# Altium footprint library MainController.PcbLib: 68 footprints (part 3 of 5)
Each footprint in its own frame and in the unit in brackets; x right, y up, seen from the top. Pads: shape width x height; smd on the part's side, far side on the other; paste and mask are expansions set on the pad; w line width, h text height; cw(c..) or ccw(c..) is an arc to the next point about the centre after c.
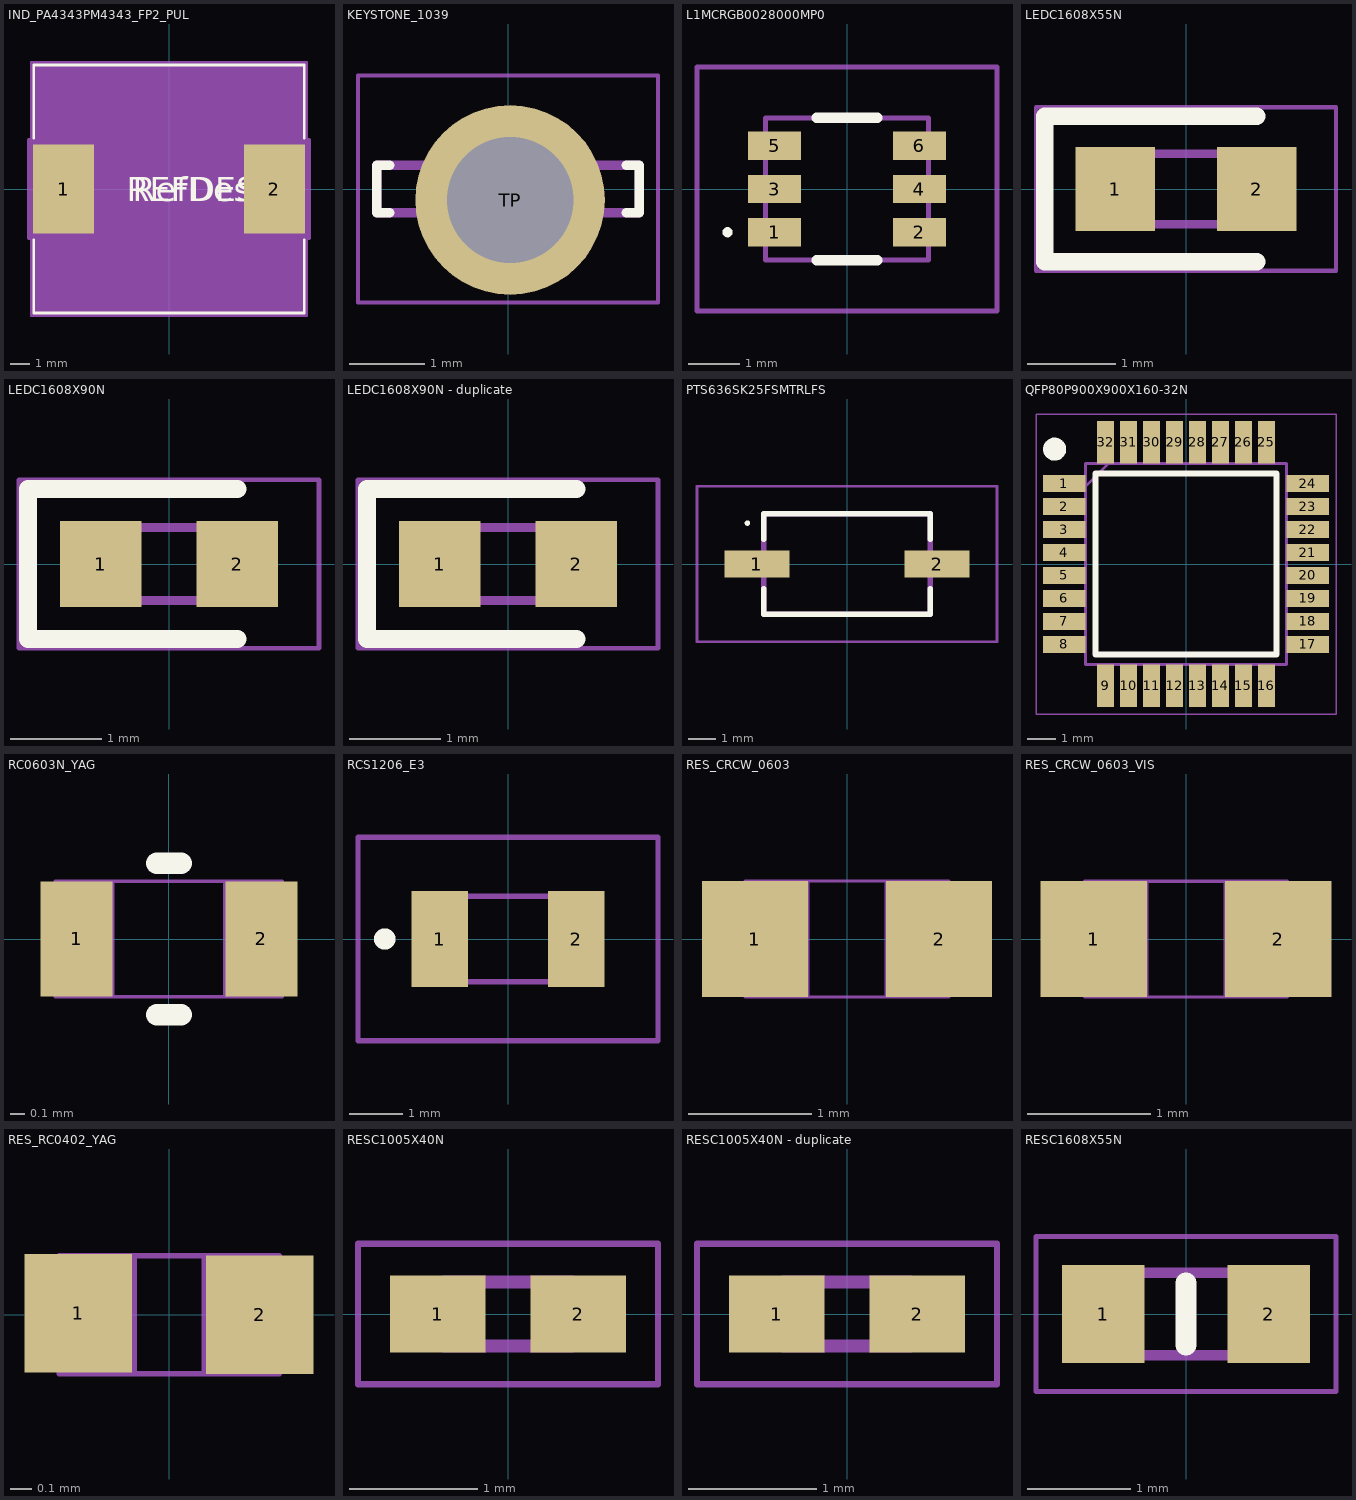
[diagram p2: the footprints below, top view; thin cyan lines are the x and y axes]

## IND_PA4343PM4343_FP2_PUL [mil]
pads (2):
  rect 126x185 smd paste+0 mask+0: 1(-218.5,0) 2(218.5,0)
Top Overlay:
  lines w6: -280.5,-105.6 -280.5,-257 280.5,-257 280.5,-105.6 ; -280.5,105.6 -280.5,257 280.5,257 280.5,105.6
  text "REFDES" at -87.5,-25 h50
  text "RefDes" at -75,-25 h50
Mechanical 13:
  lines w1: -275.5,-126 -149.5,-252 ; -275.5,126 -149.5,252 ; -275.5,-252 -275.5,252 275.5,252 275.5,-252 -275.5,-252
  text "RefDes2" at -87.5,-25 h50
Mechanical 15:
  region: 275.5,-252 -275.5,-252 -275.5,252 275.5,252
  region: -285.5,-102.5 -291.5,-102.5 -291.5,102.5 -285.5,102.5 -285.5,262 285.5,262 285.5,102.5 291.5,102.5 291.5,-102.5 285.5,-102.5 285.5,-262 -285.5,-262
  lines w6: -291.5,-102.5 -285.5,-102.5 -285.5,-262 285.5,-262 285.5,-102.5 291.5,-102.5 291.5,102.5 285.5,102.5 285.5,262 -285.5,262 -285.5,102.5 -291.5,102.5 -291.5,-102.5
3D body "IND_PA4343PM4343_FP2_PUL.step": height 255.98, standoff 0, extent -275.51,-252.01 275.51,252.01

## KEYSTONE_1039 [mm]
height 5.94
pads (1):
  round 2.535 hole 1.69 mask+0.102: TP(0.028,-0.147)
Top Overlay:
  lines w0.127: -1.581,-0.315 -1.755,-0.315 -1.755,0.315 -1.581,0.315 ; 1.581,-0.315 1.755,-0.315 1.755,0.315 1.581,0.315
Mechanical 13:
  lines w0.127: -1.755,-0.315 -1.755,0.315 1.755,0.315 1.755,-0.315 -1.755,-0.315
Mechanical 15:
  lines w0.05: -2.005,-1.518 -2.005,1.518 2.005,1.518 2.005,-1.518 -2.005,-1.518
3D body "step_temp.STEP": height 6.96, standoff -3.05, extent -1.753,-0.422 1.753,0.213

## L1MCRGB0028000MP0 [mm]
pads (6):
  rect 1.05x0.56 smd: 1(-1.425,-0.85) 2(1.425,-0.85) 3(-1.425,0) 4(1.425,0) 5(-1.425,0.85) 6(1.425,0.85)
Top Overlay:
  lines w0.1: -2.4,-0.85 ccw(c-2.35,-0.85) -2.3,-0.85 ccw(c-2.35,-0.85) -2.4,-0.85
  lines w0.2: -0.6,-1.4 0.6,-1.4 ; -0.6,1.4 0.6,1.4
Mechanical 15:
  lines w0.1: -1.6,-1.4 1.6,-1.4 1.6,1.4 -1.6,1.4 -1.6,-1.4
Mechanical 20:
  lines w0.1: -2.95,-2.4 2.95,-2.4 2.95,2.4 -2.95,2.4 -2.95,-2.4
3D body "L1MC-RGB0028000MP0.stp": height 1.78, standoff -0.02, extent -1.75,-1.4 1.75,1.4

## LEDC1608X55N [mm]
pads (2):
  rect 0.9x0.95 smd: 1(-0.8,0) 2(0.8,0)
Top Overlay:
  lines w0.2: 0.8,-0.825 -1.6,-0.825 -1.6,0.825 0.8,0.825
Mechanical 13:
  lines w0.1: -0.8,0.133 -0.533,0.4 ; -0.8,-0.4 -0.8,0.4 0.8,0.4 0.8,-0.4 -0.8,-0.4
Mechanical 15:
  lines w0.05: -1.7,-0.925 -1.7,0.925 1.7,0.925 1.7,-0.925 -1.7,-0.925
3D body "LTST-C191KRKT.stp": height 0.55, standoff 0, extent -0.83,-0.4 0.77,0.4

## LEDC1608X90N [mm]
pads (2):
  rect 0.9x0.95 smd: 1(-0.75,0) 2(0.75,0)
Top Overlay:
  lines w0.2: 0.75,-0.825 -1.55,-0.825 -1.55,0.825 0.75,0.825
Mechanical 13:
  lines w0.1: -0.8,0.133 -0.533,0.4 ; -0.8,-0.4 0.8,-0.4 0.8,0.4 -0.8,0.4 -0.8,-0.4
Mechanical 15:
  lines w0.05: -1.65,-0.925 1.65,-0.925 1.65,0.925 -1.65,0.925 -1.65,-0.925
3D body "LTST-C190GKT.stp": height 0.8, standoff 0, extent -0.82,-0.4 0.78,0.4

## LEDC1608X90N - duplicate [mm]
pads (2):
  rect 0.9x0.95 smd: 1(-0.75,0) 2(0.75,0)
Top Overlay:
  lines w0.2: 0.75,-0.825 -1.55,-0.825 -1.55,0.825 0.75,0.825
Mechanical 13:
  lines w0.1: -0.8,0.133 -0.533,0.4 ; -0.8,-0.4 -0.8,0.4 0.8,0.4 0.8,-0.4 -0.8,-0.4
Mechanical 15:
  lines w0.05: -1.65,-0.925 -1.65,0.925 1.65,0.925 1.65,-0.925 -1.65,-0.925
3D body "LTST-C190GKT.stp": height 0.8, standoff 0, extent -0.82,-0.4 0.78,0.4

## PTS636SK25FSMTRLFS [mm]
pads (2):
  rect 2.4x1 smd: 1(-3.3,0) 2(3.3,0)
Top Overlay:
  lines w0.1: -3.7,1.5 cw(c-3.65,1.5) -3.6,1.5 cw(c-3.65,1.5) -3.7,1.5
  lines w0.2: -3.05,-0.9 -3.05,-1.85 3.05,-1.85 3.05,-0.9 ; -3.05,0.9 -3.05,1.85 3.05,1.85 3.05,0.9
Mechanical 15:
  lines w0.2: -3.05,-1.85 3.05,-1.85 3.05,1.85 -3.05,1.85 -3.05,-1.85
Mechanical 20:
  lines w0.1: -5.5,-2.85 5.5,-2.85 5.5,2.85 -5.5,2.85 -5.5,-2.85

## QFP80P900X900X160-32N [mm]
pads (32):
  rect 1.475x0.6 smd: 1(-4.238,2.8) 2(-4.238,2) 3(-4.238,1.2) 4(-4.238,0.4) 5(-4.238,-0.4) 6(-4.238,-1.2) 7(-4.238,-2) 8(-4.238,-2.8) 17(4.238,-2.8) 18(4.238,-2) 19(4.238,-1.2) 20(4.238,-0.4) 21(4.238,0.4) 22(4.238,1.2) 23(4.238,2) 24(4.238,2.8)
  rect 0.6x1.475 smd: 9(-2.8,-4.238) 10(-2,-4.238) 11(-1.2,-4.238) 12(-0.4,-4.238) 13(0.4,-4.238) 14(1.2,-4.238) 15(2,-4.238) 16(2.8,-4.238) 25(2.8,4.238) 26(2,4.238) 27(1.2,4.238) 28(0.4,4.238) 29(-0.4,4.238) 30(-1.2,4.238) 31(-2,4.238) 32(-2.8,4.238)
Top Overlay:
  circle w0.4: c-4.575,4 r0.2
  lines w0.2: -3.15,-3.15 -3.15,3.15 3.15,3.15 3.15,-3.15 -3.15,-3.15
Mechanical 15:
  lines w0.1: -3.5,2.7 -2.7,3.5 ; -3.5,-3.5 -3.5,3.5 3.5,3.5 3.5,-3.5 -3.5,-3.5
Mechanical 20:
  lines w0.05: -5.225,-5.225 -5.225,5.225 5.225,5.225 5.225,-5.225 -5.225,-5.225
3D body "STM32C552KET6.stp": height 1.6, standoff 0, extent -4.5,-4.5 4.5,4.5

## RC0603N_YAG [mil]
pads (2):
  rect 20x32 smd paste+0 mask+0: 1(-25.57,0.02) 2(25.68,0.02)
Top Overlay:
  lines w6: -3.39,-21 3.39,-21 ; -3.39,21 3.39,21
Mechanical 13:
  lines w1: -31.5,-16 -31.5,16 ; -31.5,-16 31.5,-16 ; -31.5,-16 -15.5,-16 -15.5,16 -31.5,16 ; -31.5,-16 -31.5,16 ; -31.5,16 31.5,16 ; 31.5,-16 31.5,16 ; 31.5,-16 31.5,16 ; 31.5,-16 15.5,-16 15.5,16 31.5,16
3D body "RC0603N_YAG.step": height 27.99, standoff 0, extent -31.55,-15.85 31.44,16.12

## RCS1206_E3 [mm]
pads (2):
  rect 1.05x1.8 smd: 1(-1.275,0) 2(1.275,0)
Top Overlay:
  lines w0.2: -2.3,-0.1 ccw(c-2.3,0) -2.3,0.1 ccw(c-2.3,0) -2.3,-0.1
Mechanical 13:
  lines w0.1: -1.575,-0.8 -1.575,0.8 1.575,0.8 1.575,-0.8 -1.575,-0.8
Mechanical 15:
  lines w0.1: -2.8,-1.9 -2.8,1.9 2.8,1.9 2.8,-1.9 -2.8,-1.9
3D body "RCS1206120RFKEA.stp": height 0.55, standoff 0, extent -1.6,-0.8 1.6,0.8

## RES_CRCW_0603 [mil]
pads (2):
  rect 33.78x37 smd paste+0 mask+0: 1(-29.39,0) 2(29.39,0)
Mechanical 13:
  lines w1: -32.5,-18.5 -32.5,18.5 ; -32.5,-18.5 32.5,-18.5 ; -32.5,-18.5 -12.5,-18.5 -12.5,18.5 -32.5,18.5 ; -32.5,-18.5 -32.5,18.5 ; -32.5,18.5 32.5,18.5 ; 32.5,-18.5 32.5,18.5 ; 32.5,-18.5 32.5,18.5 ; 32.5,-18.5 12.5,-18.5 12.5,18.5 32.5,18.5
3D body "RES_CRCW_0603.step": height 20, standoff 0, extent -32.31,-18.75 32.73,18.25

## RES_CRCW_0603_VIS [mil]
pads (2):
  rect 34x37 smd paste+0 mask+0: 1(-29.5,0) 2(29.5,0)
Mechanical 13:
  lines w1: -32.5,-18.5 -32.5,18.5 ; -32.5,-18.5 32.5,-18.5 ; -32.5,-18.5 -12.5,-18.5 -12.5,18.5 -32.5,18.5 ; -32.5,-18.5 -32.5,18.5 ; -32.5,18.5 32.5,18.5 ; 32.5,-18.5 32.5,18.5 ; 32.5,-18.5 32.5,18.5 ; 32.5,-18.5 12.5,-18.5 12.5,18.5 32.5,18.5
3D body "RES_CRCW_0603_VIS.step": height 20, standoff 0, extent -32.59,-18.5 32.45,18.5

## RES_RC0402_YAG [mil]
pads (2):
  rect 20x22 smd paste+0 mask+0: 1(-16.97,0.27) 2(16.84,0.01)
Mechanical 13:
  lines w1: -20.5,-11 -20.5,11 ; -20.5,-11 -6.5,-11 -6.5,11 -20.5,11 ; -20.5,-11 20.5,-11 ; -20.5,-11 -20.5,11 ; -20.5,11 20.5,11 ; 20.5,-11 6.5,-11 6.5,11 20.5,11 ; 20.5,-11 20.5,11 ; 20.5,-11 20.5,11
3D body "RES_RC0402_YAG.step": height 15.98, standoff 0, extent -20.54,-11.58 20.49,10.39

## RESC1005X40N [mm]
pads (2):
  rect 0.75x0.6 smd: 1(-0.55,0) 2(0.55,0)
Mechanical 15:
  lines w0.1: -0.5,-0.25 -0.5,0.25 0.5,0.25 0.5,-0.25 -0.5,-0.25
Mechanical 20:
  lines w0.05: -1.175,-0.55 -1.175,0.55 1.175,0.55 1.175,-0.55 -1.175,-0.55
3D body "RC0402JR070RL.stp": height 0.4, standoff 0, extent -0.51,-0.245 0.49,0.255

## RESC1005X40N - duplicate [mm]
pads (2):
  rect 0.75x0.6 smd: 1(-0.55,0) 2(0.55,0)
Mechanical 13:
  lines w0.1: -0.5,-0.25 -0.5,0.25 0.5,0.25 0.5,-0.25 -0.5,-0.25
Mechanical 15:
  lines w0.05: -1.175,-0.55 -1.175,0.55 1.175,0.55 1.175,-0.55 -1.175,-0.55
3D body "RC0402FR-0747KL.stp": height 0.4, standoff 0, extent -0.5,-0.25 0.5,0.25

## RESC1608X55N [mm]
pads (2):
  rect 0.8x0.95 smd: 1(-0.8,0) 2(0.8,0)
Top Overlay:
  lines w0.2: 0,-0.3 0,0.3
Mechanical 15:
  lines w0.1: -0.8,-0.4 0.8,-0.4 0.8,0.4 -0.8,0.4 -0.8,-0.4
Mechanical 20:
  lines w0.05: -1.45,-0.75 1.45,-0.75 1.45,0.75 -1.45,0.75 -1.45,-0.75
3D body "RC0603FR0710KL.stp": height 0.45, standoff 0, extent -0.8,-0.4 0.8,0.4